# Altium integrated library MFR-25FBF52-25K5.IntLib: 1 symbol
Pins are listed as number, name and electrical type; pins without a type are passive.

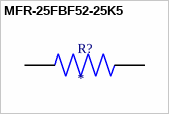
[diagram p0: symbol MFR-25FBF52-25K5]

## MFR-25FBF52-25K5
designator R?
25.5 kOhms Â±1% 0.25W, 1/4W Through Hole Resistor Axial - Metal Film; MF: Yageo; MP: MFR-25FBF52-25K5; SnapEDA_Link: https://www.snapeda.com/parts/MFR-25FBF52-25K5/Yageo/view-part/?ref=snap; Package: RADIAL-2 YAGEO; Value: *; Check_prices: https://www.snapeda.com/parts/MFR-25FBF52-25K5/Yageo/view-part/?ref=eda
footprint RESAD1100W55L680D260
pins: 1, 2